# Altium footprint library KartaRfLibs.PcbLib: 51 footprints (part 2 of 4)
Each footprint in its own frame and in the unit in brackets; x right, y up, seen from the top. Pads: shape width x height; smd on the part's side, far side on the other; paste and mask are expansions set on the pad; w line width, h text height; cw(c..) or ccw(c..) is an arc to the next point about the centre after c.
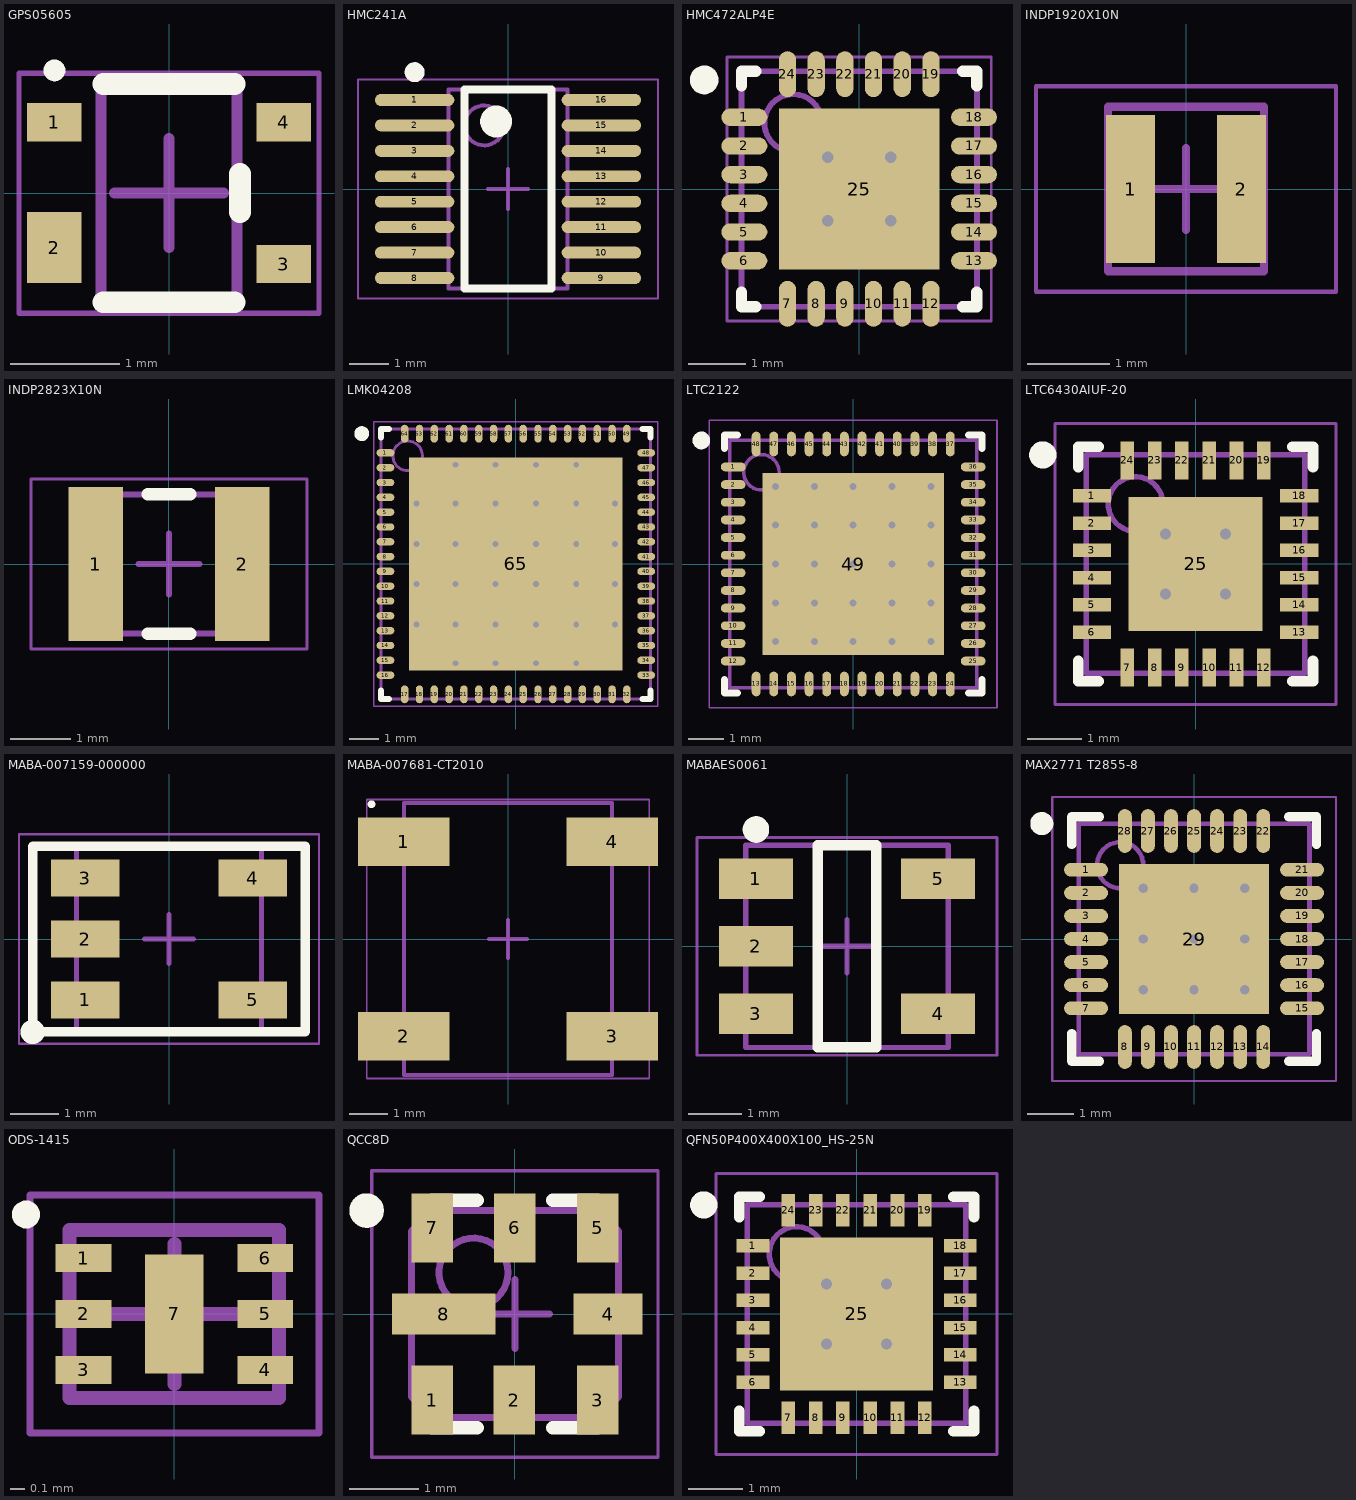
[diagram p1: the footprints below, top view; thin cyan lines are the x and y axes]

## GPS05605 [mm] "SOT343, 4-Leads, Body 2,00x2,15mm, Pitch 1,30mm, IPC High Density"
height 0.9
pads (4):
  rect 0.5x0.35 smd: 1(-1.05,0.65) 3(1.05,-0.65) 4(1.05,0.65)
  rect 0.5x0.65 smd: 2(-1.05,-0.5)
Top Overlay:
  circle w0.1: c-1.05,1.125 r0.05
  lines w0.2: -0.6,-1 0.6,-1 ; -0.6,1 0.6,1 ; 0.65,-0.175 0.65,0.175
Mechanical 13:
  lines w0.1: -0.625,-1 -0.625,1 0.625,1 0.625,-1 -0.625,-1
Mechanical 15:
  lines w0.05: -1.375,-1.1 -1.375,1.1 1.375,1.1 1.375,-1.1 -1.375,-1.1
  lines w0.1: -0.5,0 0.5,0 ; 0,-0.5 0,0.5
3D body "GPS05605.step": height 0.9, standoff 0, extent -1.225,-1 1.225,1

## HMC241A [mm] "HMC241A, SOP, 16-Leads, Body 5,00x3,00mm, Pitch 0,64mm, IPC Medium Density"
height 1.75
pads (16):
  oval 2x0.3 smd: 1(-2.35,2.24) 2(-2.35,1.6) 3(-2.35,0.96) 4(-2.35,0.32) 5(-2.35,-0.32) 6(-2.35,-0.96) 7(-2.35,-1.6) 8(-2.35,-2.24) 9(2.35,-2.24) 10(2.35,-1.6) 11(2.35,-0.96) 12(2.35,-0.32) 13(2.35,0.32) 14(2.35,0.96) 15(2.35,1.6) 16(2.35,2.24)
Top Overlay:
  circle w0.25: c-2.35,2.94 r0.125
  circle w0.4: c-0.3,1.7 r0.2
  lines w0.2: -1.1,-2.5 -1.1,2.5 1.1,2.5 1.1,-2.5 -1.1,-2.5
Mechanical 13:
  circle w0.1: c-0.6,1.6 r0.5
  lines w0.1: -1.5,-2.5 -1.5,2.5 1.5,2.5 1.5,-2.5 -1.5,-2.5
Mechanical 15:
  lines w0.05: -3.775,-2.75 -3.775,2.75 3.775,2.75 3.775,-2.75 -3.775,-2.75
  lines w0.1: -0.5,0 0.5,0 ; 0,-0.5 0,0.5
3D body "HMC241A.step": height 1.75, standoff 0, extent -3.1,-2.5 3.1,2.5

## HMC472ALP4E [mm] "HMC472ALP4E, QFN, 24-Leads, Body 4,00x4,00mm, Pitch 0,50mm, Thermal Pad 2,80x2,80mm, IPC Medium Density"
height 1
pads (25):
  oval 0.8x0.3 smd: 1(-2,1.25) 2(-2,0.75) 3(-2,0.25) 4(-2,-0.25) 5(-2,-0.75) 6(-2,-1.25) 13(2,-1.25) 14(2,-0.75) 15(2,-0.25) 16(2,0.25) 17(2,0.75) 18(2,1.25)
  oval 0.3x0.8 smd: 7(-1.25,-2) 8(-0.75,-2) 9(-0.25,-2) 10(0.25,-2) 11(0.75,-2) 12(1.25,-2) 19(1.25,2) 20(0.75,2) 21(0.25,2) 22(-0.25,2) 23(-0.75,2) 24(-1.25,2)
  rect 2.8x2.8 smd: 25(0,0)
via 0.55,-0.55 diameter 0.5 hole 0.2
via -0.55,-0.55 diameter 0.5 hole 0.2
via 0.55,0.55 diameter 0.5 hole 0.2
via -0.55,0.55 diameter 0.5 hole 0.2
Top Overlay:
  circle w0.25: c-2.7,1.9 r0.125
  lines w0.2: -2.05,-1.8 -2.05,-2.05 -1.8,-2.05 ; -2.05,1.8 -2.05,2.05 -1.8,2.05 ; 1.8,-2.05 2.05,-2.05 2.05,-1.8 ; 1.8,2.05 2.05,2.05 2.05,1.8
Mechanical 13:
  circle w0.1: c-1.15,1.15 r0.5
  lines w0.1: -2.05,-2.05 2.05,-2.05 2.05,2.05 -2.05,2.05 -2.05,-2.05
Mechanical 15:
  lines w0.05: -2.3,-2.3 2.3,-2.3 2.3,2.3 -2.3,2.3 -2.3,-2.3
  lines w0.1: -0.5,0 0.5,0 ; 0,-0.5 0,0.5
3D body "HMC472ALP4E.step": height 1, standoff 0, extent -2.05,-2.05 2.05,2.05

## INDP1920X10N [mm] "Precision Wire Wound Inductor, 2-Leads, Body 1,90x2,00mm, IPC Medium Density"
height 1
pads (2):
  rect 0.6x1.8 smd: 1(-0.675,0) 2(0.675,0)
Mechanical 13:
  lines w0.1: -0.95,-1 -0.95,1 0.95,1 0.95,-1 -0.95,-1
Mechanical 15:
  lines w0.05: -1.825,-1.25 -1.825,1.25 1.825,1.25 1.825,-1.25 -1.825,-1.25
  lines w0.1: -0.5,0 0.5,0 ; 0,-0.5 0,0.5
3D body "INDP1920X10N.step": height 1.1, standoff 0, extent -1.05,-1 1.05,1

## INDP2823X10N [mm] "Precision Wire Wound Inductor, 2-Leads, Body 2,79x2,29mm, IPC Medium Density"
height 1.02
pads (2):
  rect 0.9x2.54 smd: 1(-1.205,0) 2(1.205,0)
Top Overlay:
  lines w0.2: -0.35,-1.15 0.35,-1.15 ; -0.35,1.15 0.35,1.15
Mechanical 13:
  lines w0.1: -1.395,-1.145 -1.395,1.145 1.395,1.145 1.395,-1.145 -1.395,-1.145
Mechanical 15:
  lines w0.05: -2.275,-1.4 -2.275,1.4 2.275,1.4 2.275,-1.4 -2.275,-1.4
  lines w0.1: -0.5,0 0.5,0 ; 0,-0.5 0,0.5
3D body "INDP2823X10N.step": height 1.12, standoff 0, extent -1.495,-1.143 1.495,1.143

## LMK04208 [mm] "LMK04208, PQFN, 64-Leads, Body 9,00x9,00mm, Pitch 0,50mm, Thermal Pad 7,20x7,20mm, IPC Medium Density"
height 0.8
pads (65):
  oval 0.6x0.25 smd: 1(-4.4,3.75) 2(-4.4,3.25) 3(-4.4,2.75) 4(-4.4,2.25) 5(-4.4,1.75) 6(-4.4,1.25) 7(-4.4,0.75) 8(-4.4,0.25) 9(-4.4,-0.25) 10(-4.4,-0.75) 11(-4.4,-1.25) 12(-4.4,-1.75) 13(-4.4,-2.25) 14(-4.4,-2.75) 15(-4.4,-3.25) 16(-4.4,-3.75) 33(4.4,-3.75) 34(4.4,-3.25) 35(4.4,-2.75) 36(4.4,-2.25) 37(4.4,-1.75) 38(4.4,-1.25) 39(4.4,-0.75) 40(4.4,-0.25) 41(4.4,0.25) 42(4.4,0.75) 43(4.4,1.25) 44(4.4,1.75) 45(4.4,2.25) 46(4.4,2.75) 47(4.4,3.25) 48(4.4,3.75)
  oval 0.25x0.6 smd: 17(-3.75,-4.4) 18(-3.25,-4.4) 19(-2.75,-4.4) 20(-2.25,-4.4) 21(-1.75,-4.4) 22(-1.25,-4.4) 23(-0.75,-4.4) 24(-0.25,-4.4) 25(0.25,-4.4) 26(0.75,-4.4) 27(1.25,-4.4) 28(1.75,-4.4) 29(2.25,-4.4) 30(2.75,-4.4) 31(3.25,-4.4) 32(3.75,-4.4) 49(3.75,4.4) 50(3.25,4.4) 51(2.75,4.4) 52(2.25,4.4) 53(1.75,4.4) 54(1.25,4.4) 55(0.75,4.4) 56(0.25,4.4) 57(-0.25,4.4) 58(-0.75,4.4) 59(-1.25,4.4) 60(-1.75,4.4) 61(-2.25,4.4) 62(-2.75,4.4) 63(-3.25,4.4) 64(-3.75,4.4)
  rect 7.2x7.2 smd: 65(0,0)
via -2.04,3.35 diameter 0.5 hole 0.2
via -0.68,3.35 diameter 0.5 hole 0.2
via 0.68,3.35 diameter 0.5 hole 0.2
via 2.04,3.35 diameter 0.5 hole 0.2
via -3.35,2.04 diameter 0.5 hole 0.2
via -2.04,2.04 diameter 0.5 hole 0.2
via -0.68,2.04 diameter 0.5 hole 0.2
via 0.68,2.04 diameter 0.5 hole 0.2
via 2.04,2.04 diameter 0.5 hole 0.2
via 3.35,2.04 diameter 0.5 hole 0.2
via -3.35,0.68 diameter 0.5 hole 0.2
via -2.04,0.68 diameter 0.5 hole 0.2
via -0.68,0.68 diameter 0.5 hole 0.2
via 0.68,0.68 diameter 0.5 hole 0.2
via 2.04,0.68 diameter 0.5 hole 0.2
via 3.35,0.68 diameter 0.5 hole 0.2
via -3.35,-0.68 diameter 0.5 hole 0.2
via -2.04,-0.68 diameter 0.5 hole 0.2
via -0.68,-0.68 diameter 0.5 hole 0.2
via 0.68,-0.68 diameter 0.5 hole 0.2
via 2.04,-0.68 diameter 0.5 hole 0.2
via 3.35,-0.68 diameter 0.5 hole 0.2
via -3.35,-2.04 diameter 0.5 hole 0.2
via -2.04,-2.04 diameter 0.5 hole 0.2
via -0.68,-2.04 diameter 0.5 hole 0.2
via 0.68,-2.04 diameter 0.5 hole 0.2
via 2.04,-2.04 diameter 0.5 hole 0.2
via 3.35,-2.04 diameter 0.5 hole 0.2
via -2.04,-3.35 diameter 0.5 hole 0.2
via -0.68,-3.35 diameter 0.5 hole 0.2
via 0.68,-3.35 diameter 0.5 hole 0.2
via 2.04,-3.35 diameter 0.5 hole 0.2
Top Overlay:
  circle w0.25: c-5.2,4.4 r0.125
  lines w0.2: -4.55,-4.275 -4.55,-4.55 -4.275,-4.55 ; -4.55,4.275 -4.55,4.55 -4.275,4.55 ; 4.275,-4.55 4.55,-4.55 4.55,-4.275 ; 4.275,4.55 4.55,4.55 4.55,4.275
Mechanical 13:
  circle w0.1: c-3.65,3.65 r0.5
  lines w0.1: -4.55,-4.55 -4.55,4.55 4.55,4.55 4.55,-4.55 -4.55,-4.55
Mechanical 15:
  lines w0.05: -4.8,-4.8 -4.8,4.8 4.8,4.8 4.8,-4.8 -4.8,-4.8
  lines w0.1: -0.5,0 0.5,0 ; 0,-0.5 0,0.5
3D body "LMK04208 .step": height 0.8, standoff 0, extent -4.55,-4.55 4.55,4.55

## LTC2122 [mm] "LTC2122, QFN, 48-Leads, Body 7,00x7,00mm, Pitch 0,50mm, Thermal Pad 5,15x5,15mm, IPC Medium Density"
height 0.8
pads (49):
  oval 0.7x0.25 smd: 1(-3.4,2.75) 2(-3.4,2.25) 3(-3.4,1.75) 4(-3.4,1.25) 5(-3.4,0.75) 6(-3.4,0.25) 7(-3.4,-0.25) 8(-3.4,-0.75) 9(-3.4,-1.25) 10(-3.4,-1.75) 11(-3.4,-2.25) 12(-3.4,-2.75) 25(3.4,-2.75) 26(3.4,-2.25) 27(3.4,-1.75) 28(3.4,-1.25) 29(3.4,-0.75) 30(3.4,-0.25) 31(3.4,0.25) 32(3.4,0.75) 33(3.4,1.25) 34(3.4,1.75) 35(3.4,2.25) 36(3.4,2.75)
  oval 0.25x0.7 smd: 13(-2.75,-3.4) 14(-2.25,-3.4) 15(-1.75,-3.4) 16(-1.25,-3.4) 17(-0.75,-3.4) 18(-0.25,-3.4) 19(0.25,-3.4) 20(0.75,-3.4) 21(1.25,-3.4) 22(1.75,-3.4) 23(2.25,-3.4) 24(2.75,-3.4) 37(2.75,3.4) 38(2.25,3.4) 39(1.75,3.4) 40(1.25,3.4) 41(0.75,3.4) 42(0.25,3.4) 43(-0.25,3.4) 44(-0.75,3.4) 45(-1.25,3.4) 46(-1.75,3.4) 47(-2.25,3.4) 48(-2.75,3.4)
  rect 5.15x5.15 smd: 49(0,0)
via -2.2,2.2 diameter 0.5 hole 0.2
via -1.1,2.2 diameter 0.5 hole 0.2
via 0,2.2 diameter 0.5 hole 0.2
via 1.1,2.2 diameter 0.5 hole 0.2
via 2.2,2.2 diameter 0.5 hole 0.2
via -2.2,1.1 diameter 0.5 hole 0.2
via -1.1,1.1 diameter 0.5 hole 0.2
via 0,1.1 diameter 0.5 hole 0.2
via 1.1,1.1 diameter 0.5 hole 0.2
via 2.2,1.1 diameter 0.5 hole 0.2
via -2.2,0 diameter 0.5 hole 0.2
via -1.1,0 diameter 0.5 hole 0.2
via 0,0 diameter 0.5 hole 0.2
via 1.1,0 diameter 0.5 hole 0.2
via 2.2,0 diameter 0.5 hole 0.2
via -2.2,-1.1 diameter 0.5 hole 0.2
via -1.1,-1.1 diameter 0.5 hole 0.2
via 0,-1.1 diameter 0.5 hole 0.2
via 1.1,-1.1 diameter 0.5 hole 0.2
via 2.2,-1.1 diameter 0.5 hole 0.2
via -2.2,-2.2 diameter 0.5 hole 0.2
via -1.1,-2.2 diameter 0.5 hole 0.2
via 0,-2.2 diameter 0.5 hole 0.2
via 1.1,-2.2 diameter 0.5 hole 0.2
via 2.2,-2.2 diameter 0.5 hole 0.2
Top Overlay:
  circle w0.25: c-4.3,3.5 r0.125
  lines w0.2: -3.65,-3.275 -3.65,-3.65 -3.275,-3.65 ; -3.65,3.275 -3.65,3.65 -3.275,3.65 ; 3.275,-3.65 3.65,-3.65 3.65,-3.275 ; 3.275,3.65 3.65,3.65 3.65,3.275
Mechanical 13:
  circle w0.1: c-2.6,2.6 r0.5
  lines w0.1: -3.5,-3.5 -3.5,3.5 3.5,3.5 3.5,-3.5 -3.5,-3.5
Mechanical 15:
  lines w0.05: -4.075,-4.075 -4.075,4.075 4.075,4.075 4.075,-4.075 -4.075,-4.075
  lines w0.1: -0.5,0 0.5,0 ; 0,-0.5 0,0.5
3D body "LTC2122.step": height 0.8, standoff 0, extent -3.7,-3.7 3.7,3.7

## LTC6430AIUF-20 [mm] "LTC6430AIUF-20, QFN, 24-Leads, Body 4,00x4,00mm, Pitch 0,50mm, Thermal Pad 2,45x2,45mm, IPC Medium Density"
height 0.75
pads (25):
  rect 0.7x0.25 smd: 1(-1.9,1.25) 2(-1.9,0.75) 3(-1.9,0.25) 4(-1.9,-0.25) 5(-1.9,-0.75) 6(-1.9,-1.25) 13(1.9,-1.25) 14(1.9,-0.75) 15(1.9,-0.25) 16(1.9,0.25) 17(1.9,0.75) 18(1.9,1.25)
  rect 0.25x0.7 smd: 7(-1.25,-1.9) 8(-0.75,-1.9) 9(-0.25,-1.9) 10(0.25,-1.9) 11(0.75,-1.9) 12(1.25,-1.9) 19(1.25,1.9) 20(0.75,1.9) 21(0.25,1.9) 22(-0.25,1.9) 23(-0.75,1.9) 24(-1.25,1.9)
  rect 2.45x2.45 smd: 25(0,0)
via 0.55,-0.55 diameter 0.5 hole 0.2
via -0.55,-0.55 diameter 0.5 hole 0.2
via 0.55,0.55 diameter 0.5 hole 0.2
via -0.55,0.55 diameter 0.5 hole 0.2
Top Overlay:
  circle w0.25: c-2.8,2 r0.125
  lines w0.2: -2.15,-1.775 -2.15,-2.15 -1.775,-2.15 ; -2.15,1.775 -2.15,2.15 -1.775,2.15 ; 1.775,-2.15 2.15,-2.15 2.15,-1.775 ; 1.775,2.15 2.15,2.15 2.15,1.775
Mechanical 13:
  circle w0.1: c-1.1,1.1 r0.5
  lines w0.1: -2,-2 2,-2 2,2 -2,2 -2,-2
Mechanical 15:
  lines w0.05: -2.575,-2.575 2.575,-2.575 2.575,2.575 -2.575,2.575 -2.575,-2.575
  lines w0.1: -0.5,0 0.5,0 ; 0,-0.5 0,0.5
3D body "LTC6430AIUF-20.step": height 0.75, standoff 0, extent -2.02,-2.02 2.02,2.02

## MABA-007159-000000 [mm] "MABA-007159-000000, 5-Leads, Body 3,80x4,83mm, Pitch 1,25mm, IPC Medium Density"
height 2.6
pads (5):
  rect 1.4x0.76 smd: 1(-1.715,-1.25) 2(-1.715,0) 3(-1.715,1.25) 4(1.715,1.25) 5(1.715,-1.25)
Top Overlay:
  circle w0.25: c-2.794,-1.905 r0.125
  lines w0.2: -2.794,-1.9 -2.794,1.9 2.794,1.9 2.794,-1.9 -2.794,-1.9
Mechanical 13:
  lines w0.1: -1.9,-1.9 1.9,-1.9 1.9,1.9 -1.9,1.9 -1.9,-1.9
Mechanical 15:
  lines w0.05: -3.075,-2.15 3.075,-2.15 3.075,2.15 -3.075,2.15 -3.075,-2.15
  lines w0.1: -0.5,0 0.5,0 ; 0,-0.5 0,0.5
3D body "MABA-007159-000000.step": height 3.24, standoff 0.2, extent -2.685,-1.9 2.685,1.9

## MABA-007681-CT2010 [mm] "MABA-007681-CT2010, 4-Leads, Pitch 5,08mm,  Body 7,11x6,35mm,  IPC High Density"
height 3.33
pads (4):
  rect 2.4x1.27 smd: 1(-2.725,2.54) 2(-2.725,-2.54) 3(2.725,-2.54) 4(2.725,2.54)
Top Overlay:
  circle w0.1: c-3.572,3.528 r0.05
Mechanical 13:
  lines w0.1: -2.725,-3.555 -2.725,-3.04 ccw(c-2.725,-2.54) -2.725,-2.04 -2.725,2.04 ccw(c-2.725,2.54) -2.725,3.04 -2.725,3.555 2.725,3.555 2.725,3.04 ccw(c2.725,2.54) 2.725,2.04 2.725,-2.04 ccw(c2.725,-2.54) 2.725,-3.04 2.725,-3.555 -2.725,-3.555
Mechanical 15:
  lines w0.05: -3.695,-3.655 -3.695,3.655 3.695,3.655 3.695,-3.655 -3.695,-3.655
  lines w0.1: -0.5,0 0.5,0 ; 0,-0.5 0,0.5
3D body "MABA-007681-CT2010.step": height 3.33, standoff 0, extent -3.225,-3.555 3.225,3.555

## MABAES0061 [mm] "MABAES0061, 5-Leads, Body 3,81x4,83mm, Pitch 1,27mm, IPC Medium Density"
height 2.7
pads (5):
  rect 1.4x0.76 smd: 1(-1.715,1.27) 2(-1.715,0) 3(-1.715,-1.27) 4(1.715,-1.27) 5(1.715,1.27)
Top Overlay:
  circle w0.25: c-1.715,2.2 r0.125
  lines w0.2: -0.55,-1.9 0.55,-1.9 0.55,1.9 -0.55,1.9 -0.55,-1.9
Mechanical 13:
  lines w0.1: -1.905,-1.905 -1.905,1.905 1.905,1.905 1.905,-1.905 -1.905,-1.905
Mechanical 15:
  lines w0.05: -2.825,-2.05 -2.825,2.05 2.825,2.05 2.825,-2.05 -2.825,-2.05
  lines w0.1: -0.5,0 0.5,0 ; 0,-0.5 0,0.5
3D body "MABAES0061.step": height 2.7, standoff 0, extent -2.415,-1.903 2.415,1.903

## MAX2771 T2855-8 [mm] "MAX2771 T2855-8 QFN, 28-Leads, Body 5,00x5,00mm, Pitch 0,50mm, Thermal Pad 3,25x3,25mm, IPC Medium Density"
height 0.8
pads (29):
  oval 0.95x0.3 smd: 1(-2.34,1.5) 2(-2.34,1) 3(-2.34,0.5) 4(-2.34,0) 5(-2.34,-0.5) 6(-2.34,-1) 7(-2.34,-1.5) 15(2.34,-1.5) 16(2.34,-1) 17(2.34,-0.5) 18(2.34,0) 19(2.34,0.5) 20(2.34,1) 21(2.34,1.5)
  oval 0.3x0.95 smd: 8(-1.5,-2.34) 9(-1,-2.34) 10(-0.5,-2.34) 11(0,-2.34) 12(0.5,-2.34) 13(1,-2.34) 14(1.5,-2.34) 22(1.5,2.34) 23(1,2.34) 24(0.5,2.34) 25(0,2.34) 26(-0.5,2.34) 27(-1,2.34) 28(-1.5,2.34)
  rect 3.25x3.25 smd: 29(0,0)
via -1.1,1.1 diameter 0.5 hole 0.2
via 0,1.1 diameter 0.5 hole 0.2
via 1.1,1.1 diameter 0.5 hole 0.2
via -1.1,0 diameter 0.5 hole 0.2
via 0,0 diameter 0.5 hole 0.2
via 1.1,0 diameter 0.5 hole 0.2
via -1.1,-1.1 diameter 0.5 hole 0.2
via 0,-1.1 diameter 0.5 hole 0.2
via 1.1,-1.1 diameter 0.5 hole 0.2
Top Overlay:
  circle w0.25: c-3.3,2.5 r0.125
  lines w0.2: -2.65,-2.05 -2.65,-2.65 -2.05,-2.65 ; -2.65,2.05 -2.65,2.65 -2.05,2.65 ; 2.05,-2.65 2.65,-2.65 2.65,-2.05 ; 2.05,2.65 2.65,2.65 2.65,2.05
Mechanical 13:
  circle w0.1: c-1.6,1.6 r0.5
  lines w0.1: -2.5,-2.5 -2.5,2.5 2.5,2.5 2.5,-2.5 -2.5,-2.5
Mechanical 15:
  lines w0.05: -3.075,-3.075 -3.075,3.075 3.075,3.075 3.075,-3.075 -3.075,-3.075
  lines w0.1: -0.5,0 0.5,0 ; 0,-0.5 0,0.5
3D body "MAX2771 T2855-8 QFN50P500X500X80_HS-29N.step": height 0.8, standoff 0, extent -2.52,-2.52 2.52,2.52

## ODS-1415 [mm] "MADP-011029-14150T, PSON, 6-Leads, Body 1,20x1,50mm, Pitch 0,40mm, Thermal Pad 0,85x0,42mm, IPC Medium Density"
height 0.6
pads (7):
  rect 0.4x0.2 smd: 1(-0.65,0.4) 2(-0.65,0) 3(-0.65,-0.4) 4(0.65,-0.4) 5(0.65,0) 6(0.65,0.4)
  rect 0.42x0.85 smd: 7(0,0)
Top Overlay:
  circle w0.1: c-1.062,0.712 r0.05
Mechanical 13:
  lines w0.1: -0.75,-0.6 -0.75,0.6 0.75,0.6 0.75,-0.6 -0.75,-0.6
Mechanical 15:
  lines w0.05: -1.035,-0.85 -1.035,0.85 1.035,0.85 1.035,-0.85 -1.035,-0.85
  lines w0.1: -0.5,0 0.5,0 ; 0,-0.5 0,0.5
3D body "ODS-1415.step": height 0.6, standoff 0, extent -0.751,-0.6 0.751,0.6

## PnPSystemsLogo [mm]

## QCC8D [mm] "B1642 SAW Filter, 8-Leads, Body 3,00x3,00mm, Pitch 1,00mm, IPC Medium Density"
height 1.1
pads (8):
  rect 0.6x1 smd: 1(-1.2,-1.25) 2(-0.01,-1.25) 3(1.2,-1.25) 5(1.2,1.25) 6(0,1.25) 7(-1.2,1.25)
  rect 1x0.6 smd: 4(1.35,0)
  rect 1.5x0.6 smd: 8(-1.03,0)
Top Overlay:
  circle w0.25: c-2.15,1.5 r0.125
  lines w0.2: -1.2,-1.65 -0.55,-1.65 ; -1.2,1.65 -0.55,1.65 ; 0.55,-1.65 1.2,-1.65 ; 0.55,1.65 1.2,1.65
Mechanical 13:
  circle w0.1: c-0.6,0.6 r0.5
  lines w0.1: -1.5,-1.2 -1.2,-1.5 1.2,-1.5 1.5,-1.2 1.5,1.2 1.2,1.5 -1.2,1.5 -1.5,1.2 -1.5,-1.2
Mechanical 15:
  lines w0.05: -2.075,-2.075 -2.075,2.075 2.075,2.075 2.075,-2.075 -2.075,-2.075
  lines w0.1: -0.5,0 0.5,0 ; 0,-0.5 0,0.5
3D body "QCC8D .step": height 1.1, standoff 0, extent -1.52,-1.52 1.52,1.52

## QFN50P400X400X100_HS-25N [mm] "QFN, 24-Leads, Body 4,00x4,00mm, Pitch 0,50mm, Thermal Pad 2,80x2,80mm, IPC Medium Density"
height 1
pads (25):
  rect 0.6x0.25 smd: 1(-1.9,1.25) 2(-1.9,0.75) 3(-1.9,0.25) 4(-1.9,-0.25) 5(-1.9,-0.75) 6(-1.9,-1.25) 13(1.9,-1.25) 14(1.9,-0.75) 15(1.9,-0.25) 16(1.9,0.25) 17(1.9,0.75) 18(1.9,1.25)
  rect 0.25x0.6 smd: 7(-1.25,-1.9) 8(-0.75,-1.9) 9(-0.25,-1.9) 10(0.25,-1.9) 11(0.75,-1.9) 12(1.25,-1.9) 19(1.25,1.9) 20(0.75,1.9) 21(0.25,1.9) 22(-0.25,1.9) 23(-0.75,1.9) 24(-1.25,1.9)
  rect 2.8x2.8 smd: 25(0,0)
via -0.55,0.55 diameter 0.5 hole 0.2
via 0.55,0.55 diameter 0.5 hole 0.2
via -0.55,-0.55 diameter 0.5 hole 0.2
via 0.55,-0.55 diameter 0.5 hole 0.2
Top Overlay:
  circle w0.25: c-2.8,2 r0.125
  lines w0.2: -2.15,-1.775 -2.15,-2.15 -1.775,-2.15 ; -2.15,1.775 -2.15,2.15 -1.775,2.15 ; 1.775,-2.15 2.15,-2.15 2.15,-1.775 ; 1.775,2.15 2.15,2.15 2.15,1.775
Mechanical 13:
  circle w0.1: c-1.1,1.1 r0.5
  lines w0.1: -2,-2 -2,2 2,2 2,-2 -2,-2
Mechanical 15:
  lines w0.05: -2.575,-2.575 -2.575,2.575 2.575,2.575 2.575,-2.575 -2.575,-2.575
  lines w0.1: -0.5,0 0.5,0 ; 0,-0.5 0,0.5
3D body "QFN50P400X400X100_HS-25N.step": height 1, standoff 0, extent -2.02,-2.02 2.02,2.02